# Altium footprint library P05_ECG.PcbLib: 19 footprints (part 2 of 2)
Each footprint in its own frame and in the unit in brackets; x right, y up, seen from the top. Pads: shape width x height; smd on the part's side, far side on the other; paste and mask are expansions set on the pad; w line width, h text height; cw(c..) or ccw(c..) is an arc to the next point about the centre after c.
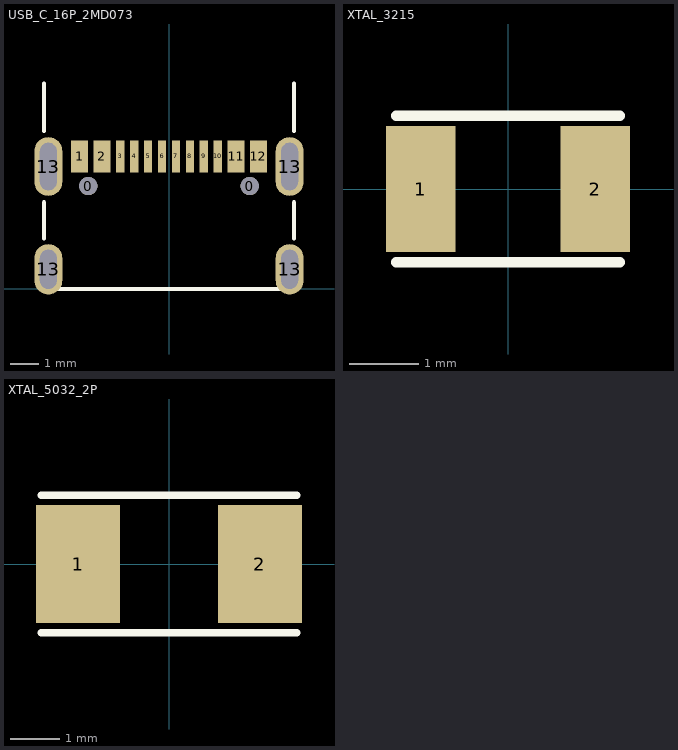
[diagram p1: the footprints below, top view; thin cyan lines are the x and y axes]

## USB_C_16P_2MD073 [mm] "USB Type-C 16-Pin SMD SHOUHAN 2MD(073)"
height 3.16
pads (18):
  round 0.65 hole 0.65 unplated: 0(-2.89,3.68) 0(2.89,3.68)
  rect 0.6x1.15 smd: 1(-3.2,4.745) 2(-2.4,4.745) 11(2.4,4.745) 12(3.2,4.745)
  rect 0.3x1.15 smd: 3(-1.75,4.745) 4(-1.25,4.745) 5(-0.75,4.745) 6(-0.25,4.745) 7(0.25,4.745) 8(0.75,4.745) 9(1.25,4.745) 10(1.75,4.745)
  oval 1x1.8 hole 0.6 slot 1.4 at 90 deg: 13(-4.32,0.7) 13(4.32,0.7)
  oval 1x2.1 hole 0.6 slot 1.7 at 90 deg: 13(-4.32,4.38) 13(4.32,4.38)
Top Overlay:
  lines w0.15: -4.47,0 4.47,0 ; -4.47,1.8 -4.47,3.1 ; -4.47,5.65 -4.47,7.35 ; 4.47,1.8 4.47,3.1 ; 4.47,5.65 4.47,7.35

## XTAL_3215 [mm] "Epson FC-135R 32.768kHz 3.2x1.5mm"
height 0.8
pads (2):
  rect 1x1.8 smd: 1(-1.25,0) 2(1.25,0)
Top Overlay:
  lines w0.15: -1.6,-1.05 1.6,-1.05 ; -1.6,1.05 1.6,1.05
3D body: height 0.8, standoff 0, extent -1.6,-0.75 1.6,0.75

## XTAL_5032_2P [mm] "SMD Crystal 5.0x3.2mm 2-Pad YSX530GA"
height 1.2
pads (2):
  rect 1.7x2.4 smd: 1(-1.85,0) 2(1.85,0)
Top Overlay:
  lines w0.15: -2.6,-1.4 2.6,-1.4 ; -2.6,1.4 2.6,1.4